# EAGLE library part VEML6030 (library VEML6030)
VEML6030 Vishay, Ambient Light Sensor, Ambient Light to Digital Data I2C 6-Pin Source: Datasheet <https://www.vishay.com/docs/84366/veml6030.pdf>
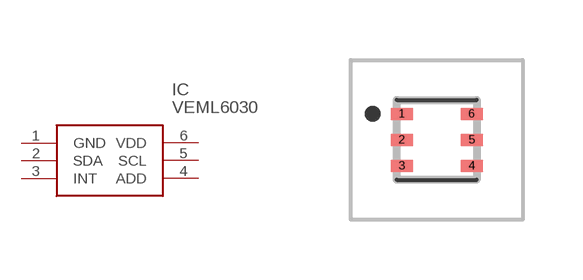
[diagram p0: symbol with the pads of VEML6030; footprint VEML6030]

Designator prefix IC

## VEML6030 (Description: VEML6030 Vishay, Ambient Light Sensor, Ambient Light to Digital Data I2C 6-Pin; Height: 0.87mm; Manufacturer_Name: Vishay; Manufacturer_Part_Number: VEML6030; Mouser_Part_Number: 78-VEML6030; Mouser_Price-Stock: https://www.mouser.co.uk/ProductDetail/Vishay-Semiconductors/VEML6030?qs=oeTp6q%252Bm7GMZCCnCKRrv4g%3D%3D)  [VEML6030]
1  GND
2  SDA
3  INT
4  ADD
5  SCL
6  VDD

## Footprint VEML6030 (pad centres in mm)
VEML6030-3
smd 0.55 x 0.3: 1 -0.875,0.65; 2 -0.875,0; 3 -0.875,-0.65; 4 0.875,-0.65; 5 0.875,0; 6 0.875,0.65